# EAGLE library part CY7C65213-32LTXI (library CY7C65213-32LTXI)
USB Interface IC USB-UART LP Bridge Controller Source: Datasheet <https://www.cypress.com/file/139881/download>
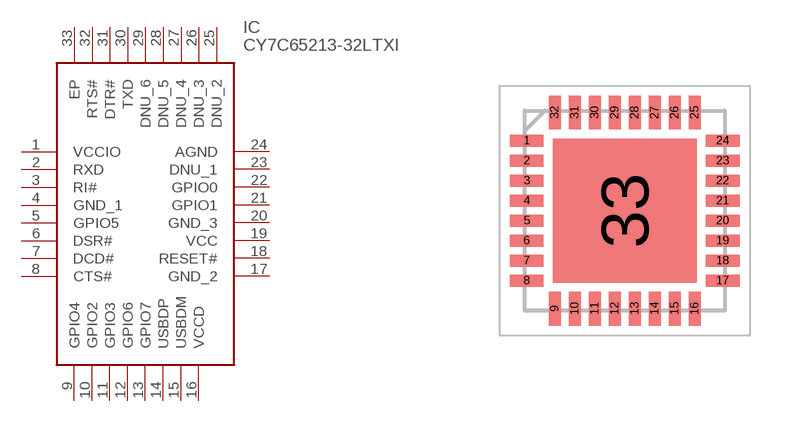
[diagram p0: symbol with the pads of QFN50P500X500X100-33N; footprint QFN50P500X500X100-33N]

Designator prefix IC

## CY7C65213-32LTXI (Description: USB Interface IC USB-UART LP Bridge Controller; Height: 1mm; Manufacturer_Name: Infineon; Manufacturer_Part_Number: CY7C65213-32LTXI; Mouser_Part_Number: 727-CY7C65213-32LTXI; Mouser_Price-Stock: https://www.mouser.co.uk/ProductDetail/Cypress-Semiconductor/CY7C65213-32LTXI?qs=zaNmQhktveH29yVGSodaDg%3D%3D)  [QFN50P500X500X100-33N]
1  VCCIO
2  RXD
3  RI#
4  GND_1
5  GPIO5
6  DSR#
7  DCD#
8  CTS#
9  GPIO4
10  GPIO2
11  GPIO3
12  GPIO6
13  GPIO7
14  USBDP
15  USBDM
16  VCCD
17  GND_2
18  RESET#
19  VCC
20  GND_3
21  GPIO1
22  GPIO0
23  DNU_1
24  AGND
25  DNU_2
26  DNU_3
27  DNU_4
28  DNU_5
29  DNU_6
30  TXD
31  DTR#
32  RTS#
33  EP

## Footprint QFN50P500X500X100-33N (pad centres in mm)
QFN-32
smd 0.85 x 0.3: 1 -2.45,1.75; 2 -2.45,1.25; 3 -2.45,0.75; 4 -2.45,0.25; 5 -2.45,-0.25; 6 -2.45,-0.75; 7 -2.45,-1.25; 8 -2.45,-1.75; 17 2.45,-1.75; 18 2.45,-1.25; 19 2.45,-0.75; 20 2.45,-0.25; 21 2.45,0.25; 22 2.45,0.75; 23 2.45,1.25; 24 2.45,1.75
smd 0.3 x 0.85: 9 -1.75,-2.45; 10 -1.25,-2.45; 11 -0.75,-2.45; 12 -0.25,-2.45; 13 0.25,-2.45; 14 0.75,-2.45; 15 1.25,-2.45; 16 1.75,-2.45; 25 1.75,2.45; 26 1.25,2.45; 27 0.75,2.45; 28 0.25,2.45; 29 -0.25,2.45; 30 -0.75,2.45; 31 -1.25,2.45; 32 -1.75,2.45
smd 3.6 x 3.6: 33 0,0